# Altium footprint library CUI_PJ-045H.PcbLib: 1 footprints
Each footprint in its own frame and in the unit in brackets; x right, y up, seen from the top. Pads: shape width x height; smd on the part's side, far side on the other; paste and mask are expansions set on the pad; w line width, h text height; cw(c..) or ccw(c..) is an arc to the next point about the centre after c.
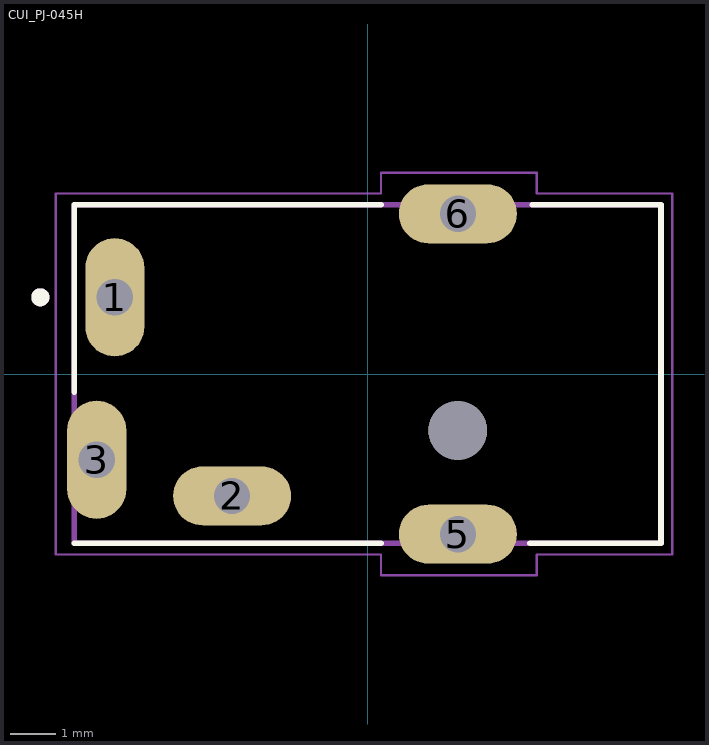
[diagram p0: the footprint, top view; thin cyan lines are the x and y axes]

## CUI_PJ-045H [mm]
pads (6):
  oval 1.308x2.616 hole 0.8 square mask+0.102: 1(-5.6,1.7) 3(-6,-1.9)
  oval 2.616x1.308 hole 0.8 square mask+0.102: 2(-3,-2.7) 5(2,-3.55) 6(2,3.55)
  round 1.3 hole 1.3 unplated mask+0: ""(2,-1.25)
Top Overlay:
  circle w0.2: c-7.25,1.7 r0.1
  lines w0.127: -6.5,-3.75 0.3,-3.75 ; -6.5,-0.4 -6.5,3.75 0.3,3.75 ; 3.6,-3.75 6.5,-3.75 6.5,3.75 3.65,3.75
Assembly Top:
  circle w0.2: c-7.25,1.7 r0.1
  lines w0.127: -6.5,-3.75 6.5,-3.75 6.5,3.75 -6.5,3.75 -6.5,-3.75
Courtyard Top:
  lines w0.05: -6.91,-4 -6.91,4 0.3,4 0.3,4.46 3.75,4.46 3.75,4 6.75,4 6.75,-4 3.75,-4 3.75,-4.46 0.3,-4.46 0.3,-4 -6.91,-4
3D body "PJ-045H--3DModel-STEP-1.STEP": height 6.3, standoff -2.6, extent -6.523,-3.75 6.477,3.75